# Altium schematic symbol library Borisov.schlib: 51 symbols
Pins are listed as number, name and electrical type; pins without a type are passive.

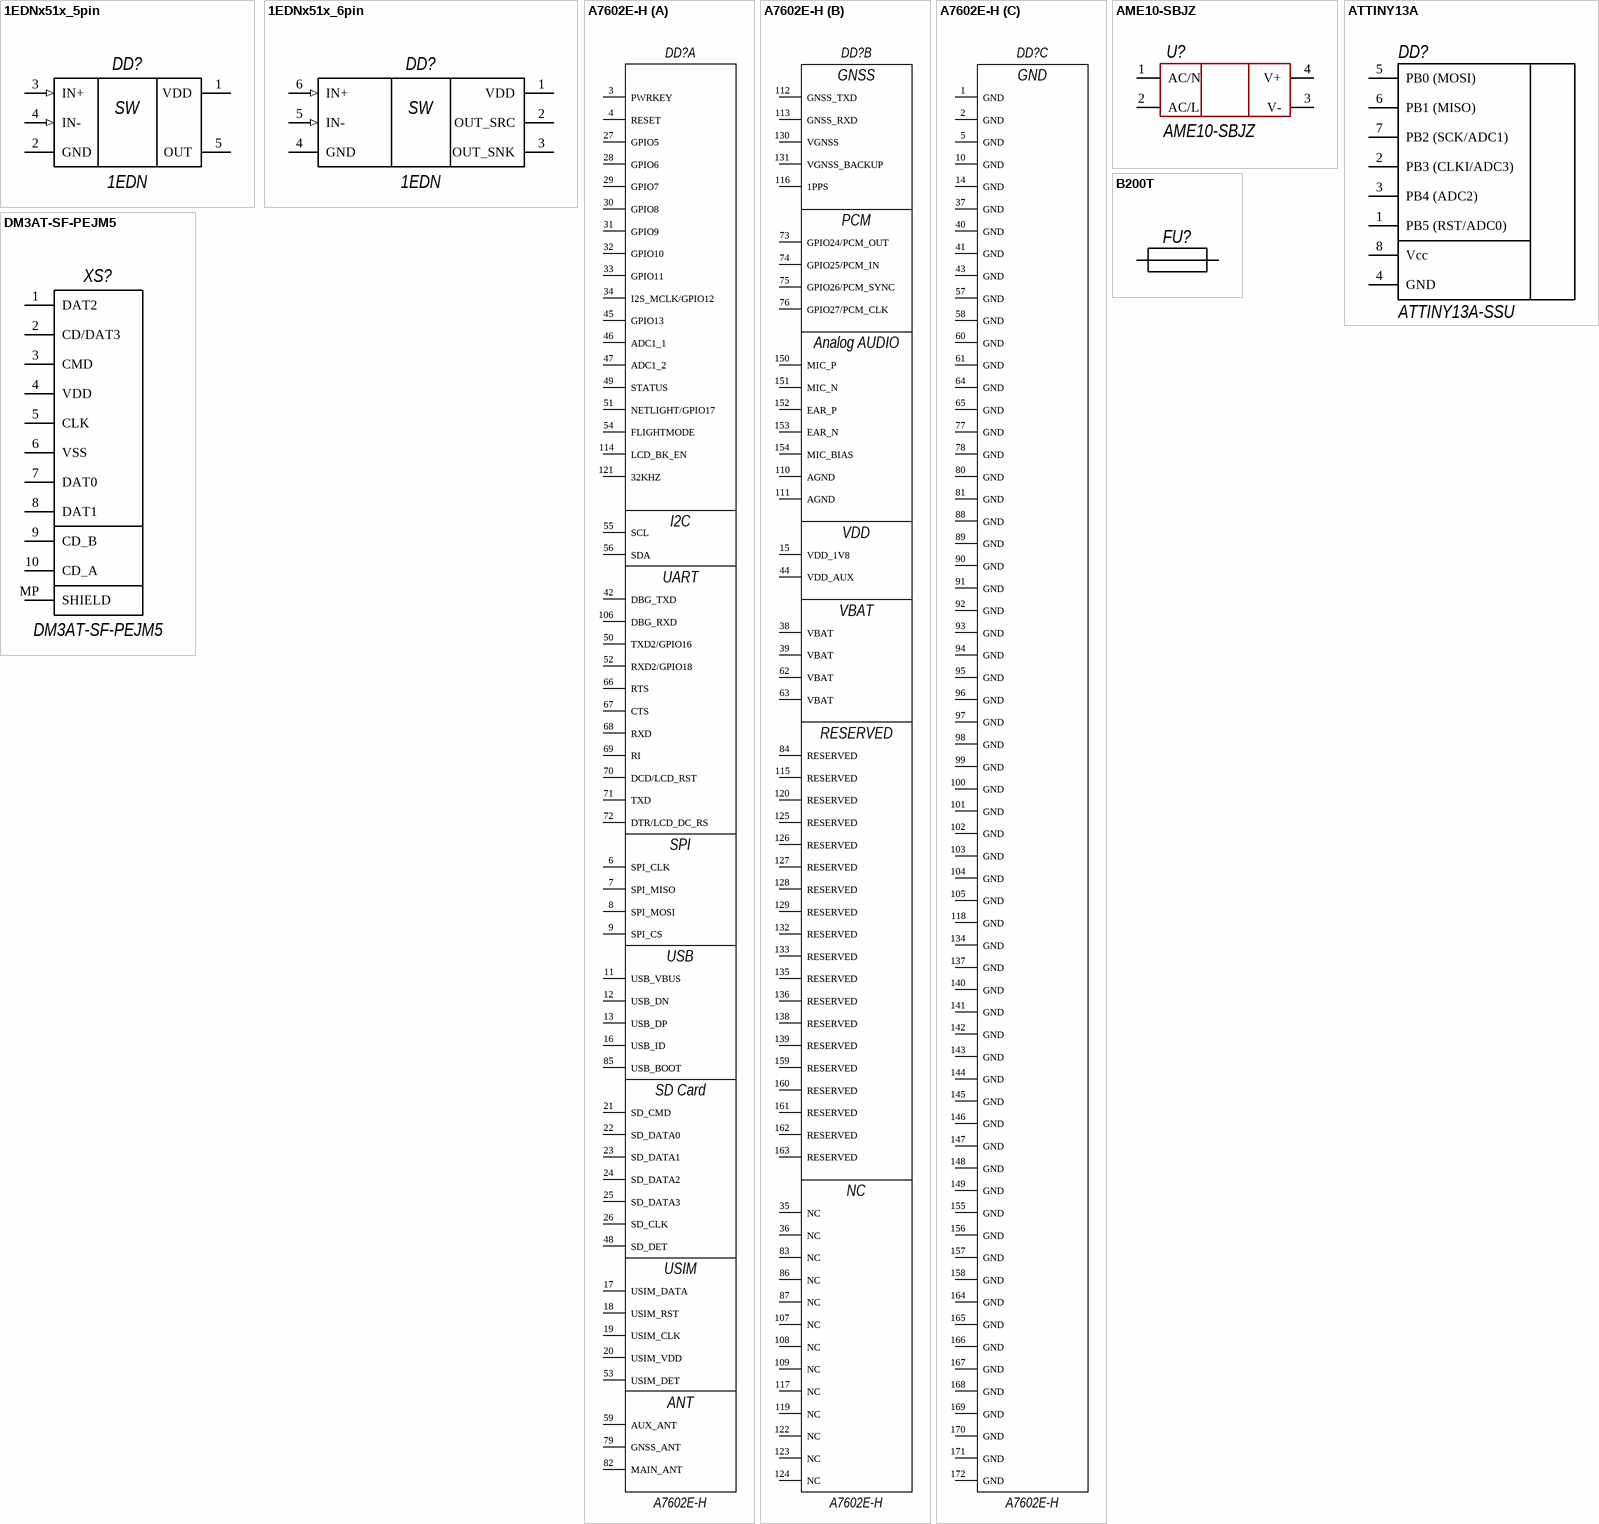
[diagram p0: symbols 1EDNx51x_5pin to DM3AT-SF-PEJM5]

## 1EDNx51x_5pin
designator DD?, comment 1EDN
Драйвер MOSFET, 1-канал, Low-Side, не-/инвертирующий, 4/8А, 4.5…20В
footprint SOT-23-5
pins: 1 VDD (power), 2 GND (power), 3 IN+ (in), 4 IN- (in), 5 OUT
text: SW

## 1EDNx51x_6pin
designator DD?, comment 1EDN
Драйвер MOSFET, 1-канал, Low-Side, не-/инвертирующий, 4/8А, 4.5…20В
footprint SOT-23-6
pins: 1 VDD (power), 2 OUT_SRC, 3 OUT_SNK, 4 GND (power), 5 IN- (in), 6 IN+ (in)
text: SW

## A7602E-H
designator DD?
footprint A7602EH
part A pins: 3 PWRKEY, 4 RESET, 6 SPI_CLK, 7 SPI_MISO, 8 SPI_MOSI, 9 SPI_CS, 11 USB_VBUS, 12 USB_DN, 13 USB_DP, 16 USB_ID, 17 USIM_DATA, 18 USIM_RST, 19 USIM_CLK, 20 USIM_VDD, 21 SD_CMD, 22 SD_DATA0, 23 SD_DATA1, 24 SD_DATA2, 25 SD_DATA3, 26 SD_CLK, 27 GPIO5, 28 GPIO6, 29 GPIO7, 30 GPIO8, 31 GPIO9, 32 GPIO10, 33 GPIO11, 34 I2S_MCLK/GPIO12, 42 DBG_TXD, 45 GPIO13, 46 ADC1_1, 47 ADC1_2, 48 SD_DET, 49 STATUS, 50 TXD2/GPIO16, 51 NETLIGHT/GPIO17, 52 RXD2/GPIO18, 53 USIM_DET, 54 FLIGHTMODE, 55 SCL, 56 SDA, 59 AUX_ANT, 66 RTS, 67 CTS, 68 RXD, 69 RI, 70 DCD/LCD_RST, 71 TXD, 72 DTR/LCD_DC_RS, 79 GNSS_ANT, 82 MAIN_ANT, 85 USB_BOOT, 106 DBG_RXD, 114 LCD_BK_EN, 121 32KHZ
part B pins: 15 VDD_1V8 (power), 35 NC, 36 NC, 38 VBAT (power), 39 VBAT (power), 44 VDD_AUX (power), 62 VBAT (power), 63 VBAT (power), 73 GPIO24/PCM_OUT, 74 GPIO25/PCM_IN, 75 GPIO26/PCM_SYNC, 76 GPIO27/PCM_CLK, 83 NC, 84 RESERVED, 86 NC, 87 NC, 107 NC, 108 NC (power), 109 NC (power), 110 AGND (power), 111 AGND (power), 112 GNSS_TXD, 113 GNSS_RXD, 115 RESERVED, 116 1PPS, 117 NC, 119 NC, 120 RESERVED, 122 NC, 123 NC, 124 NC, 125 RESERVED, 126 RESERVED, 127 RESERVED, 128 RESERVED, 129 RESERVED, 130 VGNSS, 131 VGNSS_BACKUP, 132 RESERVED, 133 RESERVED, 135 RESERVED, 136 RESERVED, 138 RESERVED, 139 RESERVED, 150 MIC_P, 151 MIC_N, 152 EAR_P, 153 EAR_N, 154 MIC_BIAS, 159 RESERVED, 160 RESERVED, 161 RESERVED, 162 RESERVED, 163 RESERVED
part C pins: 1 GND (power), 2 GND (power), 5 GND (power), 10 GND (power), 14 GND (power), 37 GND (power), 40 GND (power), 41 GND (power), 43 GND (power), 57 GND (power), 58 GND (power), 60 GND (power), 61 GND (power), 64 GND (power), 65 GND (power), 77 GND (power), 78 GND (power), 80 GND (power), 81 GND (power), 88 GND (power), 89 GND (power), 90 GND (power), 91 GND (power), 92 GND (power), 93 GND (power), 94 GND (power), 95 GND (power), 96 GND (power), 97 GND (power), 98 GND (power), 99 GND (power), 100 GND (power), 101 GND (power), 102 GND (power), 103 GND (power), 104 GND (power), 105 GND (power), 118 GND (power), 134 GND (power), 137 GND (power), 140 GND (power), 141 GND (power), 142 GND (power), 143 GND (power), 144 GND (power), 145 GND (power), 146 GND (power), 147 GND (power), 148 GND (power), 149 GND (power), 155 GND (power), 156 GND (power), 157 GND (power), 158 GND (power), 164 GND (power), 165 GND (power), 166 GND (power), 167 GND (power), 168 GND (power), 169 GND (power), 170 GND (power), 171 GND (power), 172 GND (power)
part A text: I2C; UART; SPI; USB; SD Card; USIM; ANT
part B text: GNSS; PCM; Analog AUDIO; VDD

## AME10-SBJZ
designator U?
AC/DC; 10W; Vin: 90-528VAC, 100-745VDC;
footprint AME10-SBJZ
pins: 1 AC/N, 2 AC/L, 3 V-, 4 V+

## ATTINY13A
designator DD?, comment ATTINY13A-SSU
Микроконтроллер 8-Бит, picoPower, AVR, 20МГц, 1КБ Flash [SO-8]
footprint SO-8
pins: 1 PB5 (RST/ADC0), 2 PB3 (CLKI/ADC3), 3 PB4 (ADC2), 4 GND, 5 PB0 (MOSI), 6 PB1 (MISO), 7 PB2 (SCK/ADC1), 8 Vcc

## B200T
designator FU?  (value not drawn)
FUSE BOARD MOUNT 2A 600VAC 2SMD; Manufacturer: Bourns Inc.; Time-Current Type: {Time-Current Type}; Voltage Breaking AC: 600V; DC Cold Resistance: 0.056; Type: SMD
footprint B2000T_ (FUSE BOARD MOUNT 2A 600VAC 2SMD)
pins: 1, 2

## DM3AT-SF-PEJM5
designator XS?
microSD
footprint DM3ATSFPEJM5
pins: 1 DAT2, 2 CD/DAT3, 3 CMD, 4 VDD, 5 CLK, 6 VSS, 7 DAT0, 8 DAT1, 9 CD_B, 10 CD_A, MP SHIELD

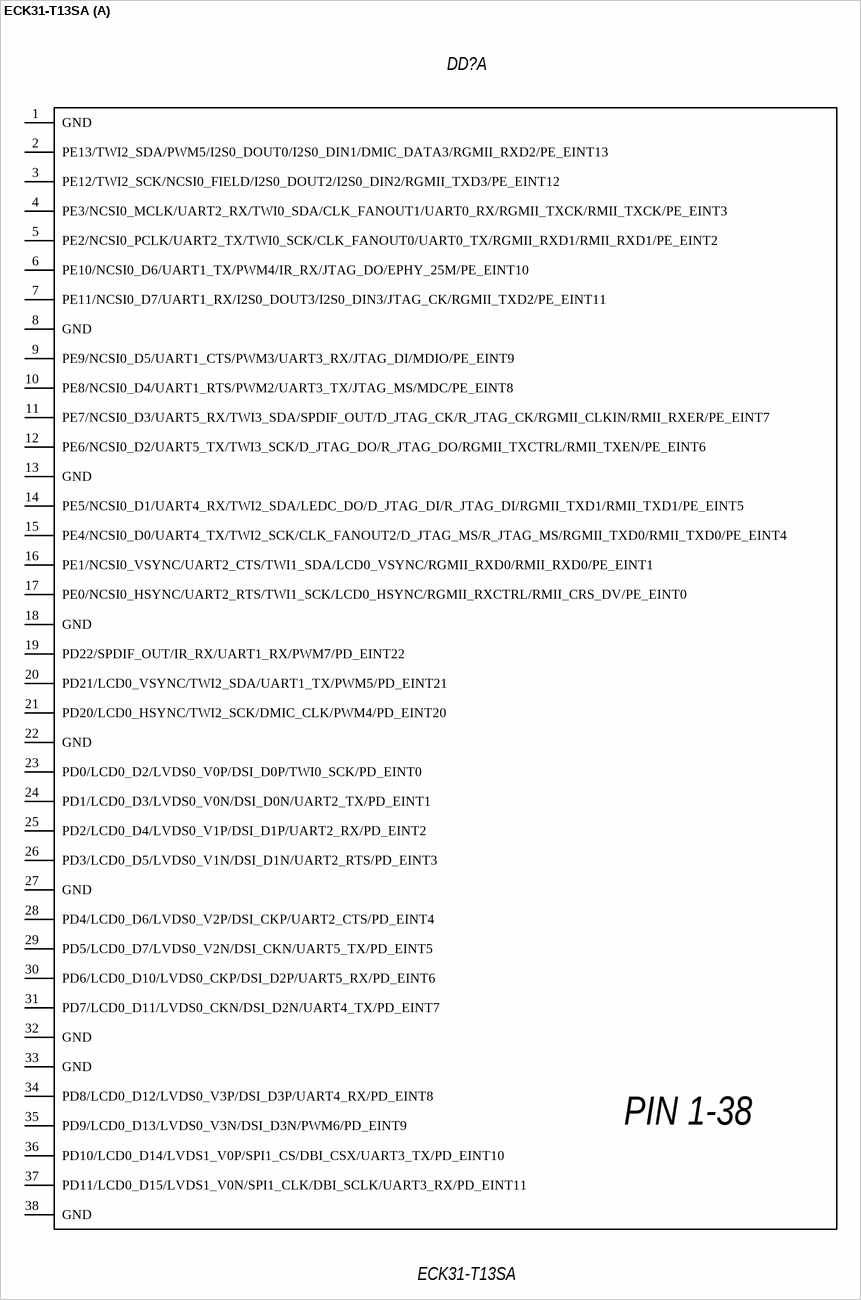
[diagram p1: symbol ECK31-T13SA]

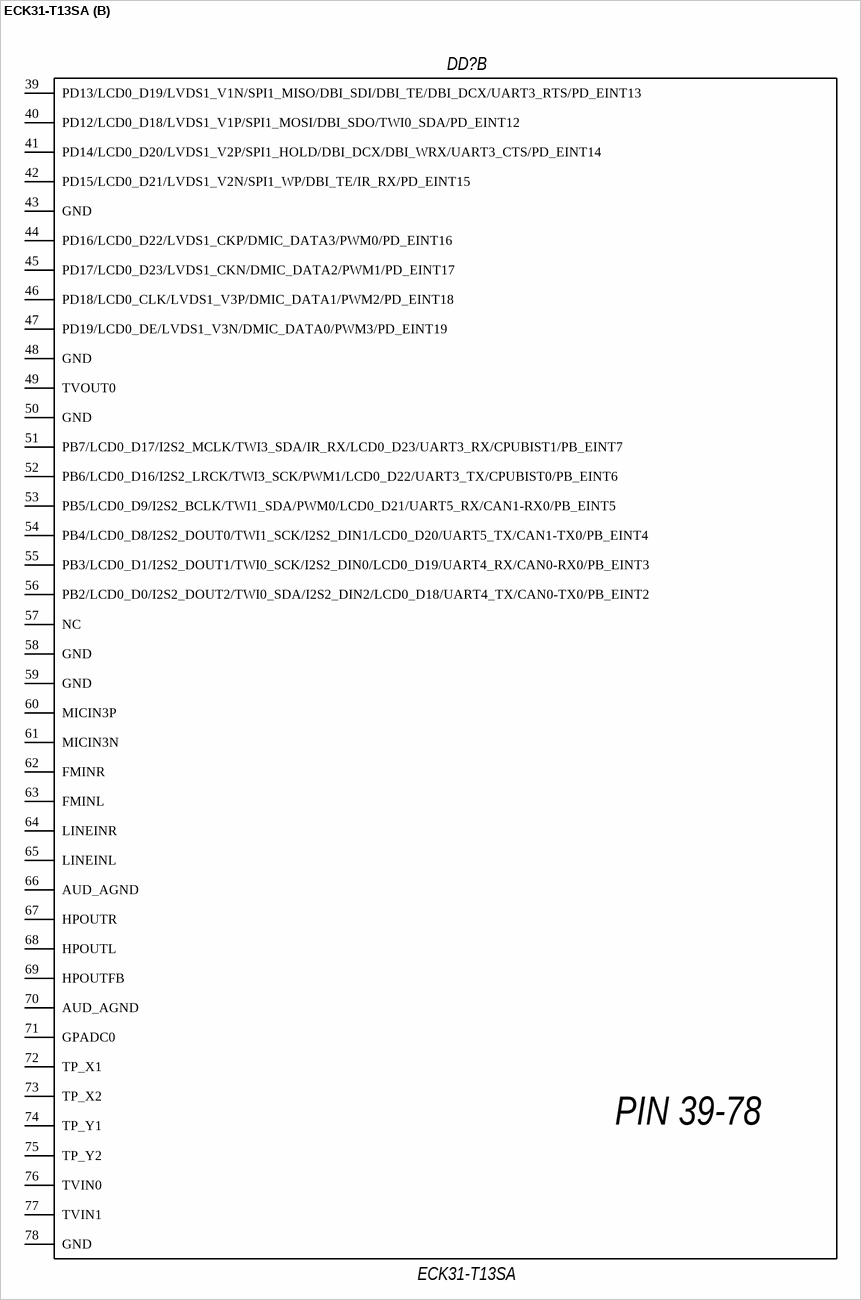
[diagram p2: symbol ECK31-T13SA]

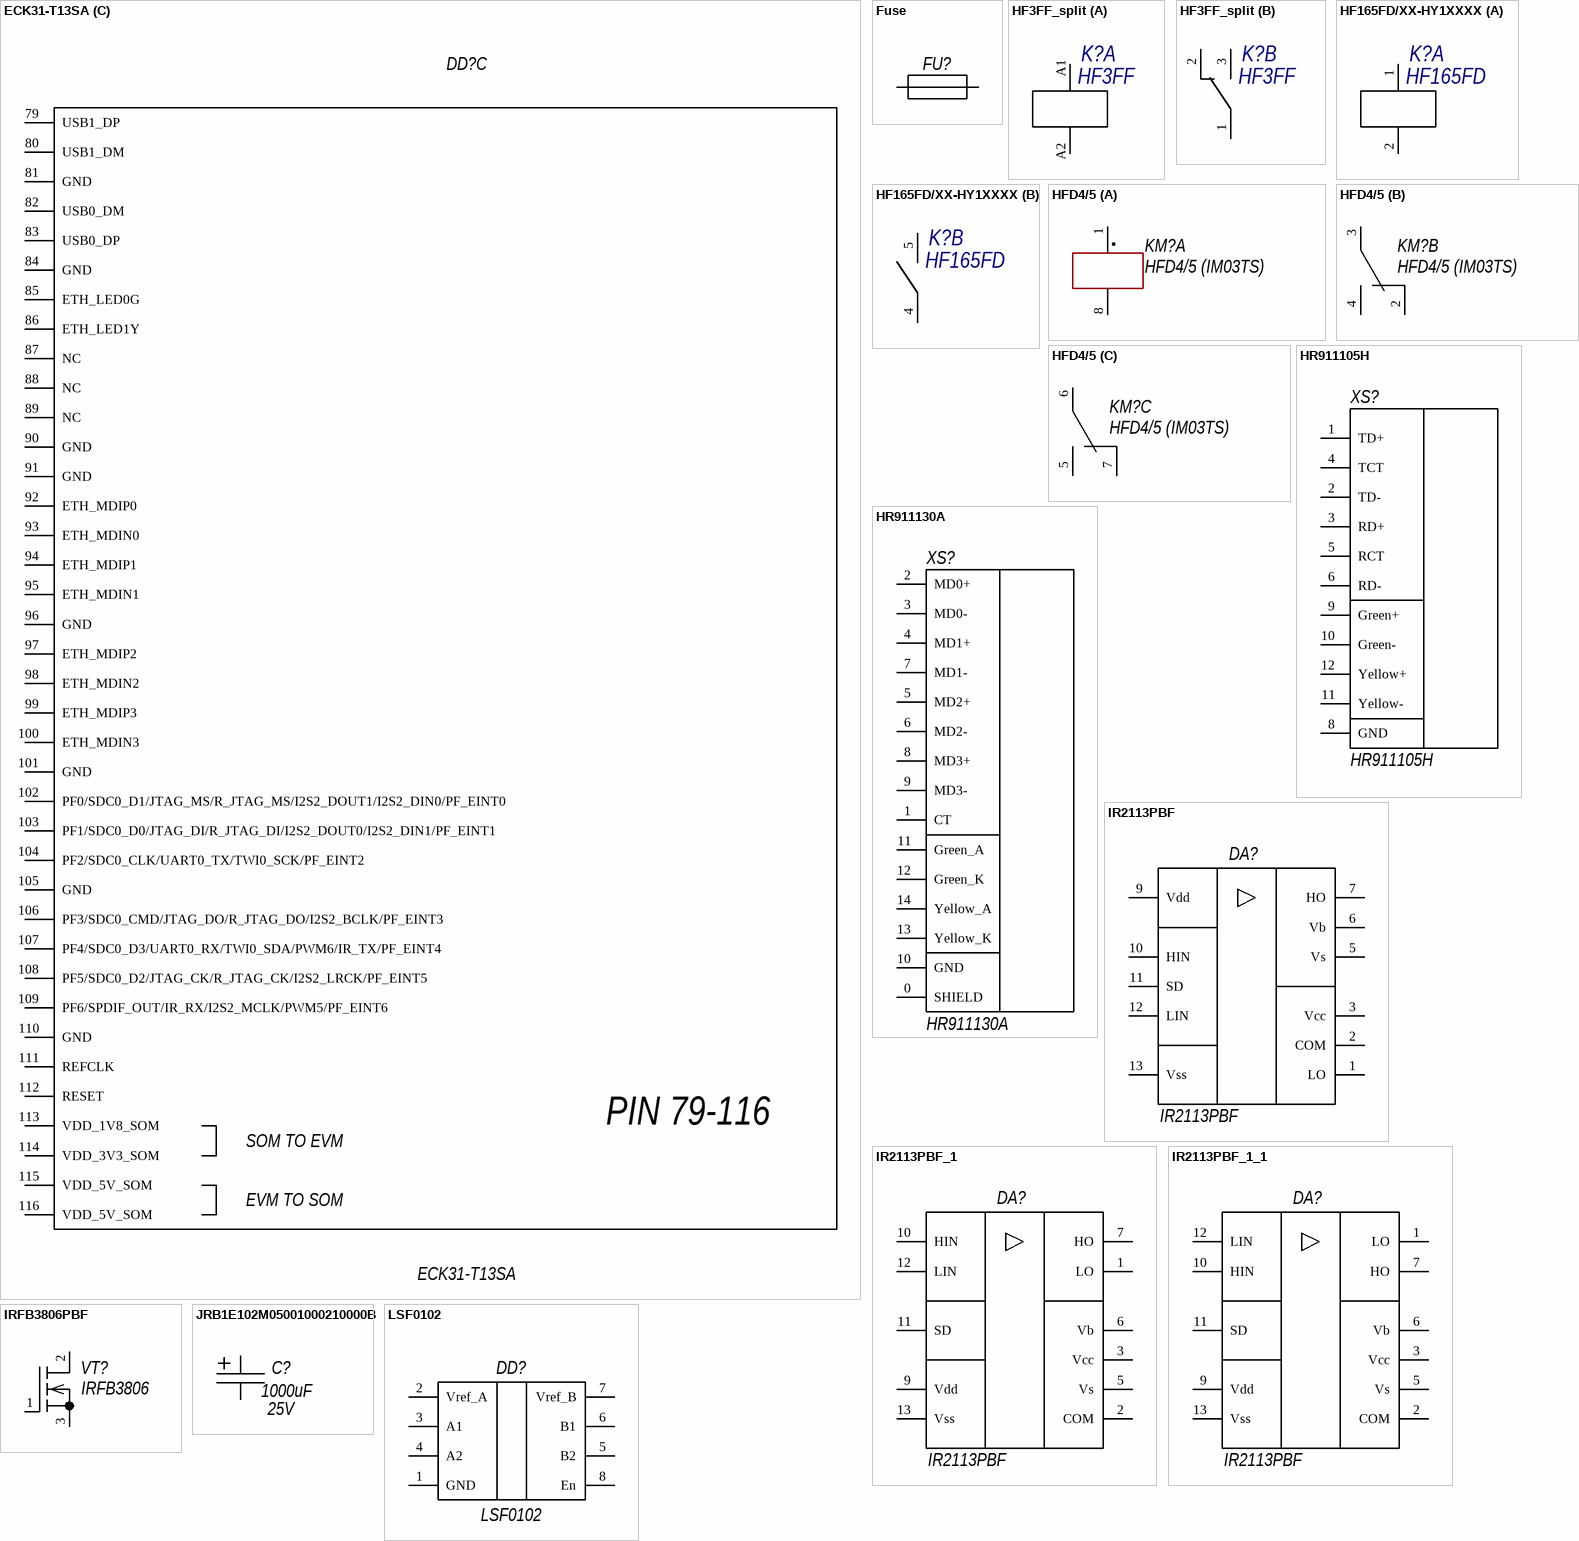
[diagram p3: symbols ECK31-T13SA to LSF0102]

## ECK31-T13SA
designator DD?
footprint ECK31_T13SA_P116
part A pins: 1 GND (power), 2 PE13/TWI2_SDA/PWM5/I2S0_DOUT0/I2S0_DIN1/DMIC_DATA3/RGMII_RXD2/PE_EINT13, 3 PE12/TWI2_SCK/NCSI0_FIELD/I2S0_DOUT2/I2S0_DIN2/RGMII_TXD3/PE_EINT12, 4 PE3/NCSI0_MCLK/UART2_RX/TWI0_SDA/CLK_FANOUT1/UART0_RX/RGMII_TXCK/RMII_TXCK/PE_EINT3, 5 PE2/NCSI0_PCLK/UART2_TX/TWI0_SCK/CLK_FANOUT0/UART0_TX/RGMII_RXD1/RMII_RXD1/PE_EINT2, 6 PE10/NCSI0_D6/UART1_TX/PWM4/IR_RX/JTAG_DO/EPHY_25M/PE_EINT10, 7 PE11/NCSI0_D7/UART1_RX/I2S0_DOUT3/I2S0_DIN3/JTAG_CK/RGMII_TXD2/PE_EINT11, 8 GND (power), 9 PE9/NCSI0_D5/UART1_CTS/PWM3/UART3_RX/JTAG_DI/MDIO/PE_EINT9, 10 PE8/NCSI0_D4/UART1_RTS/PWM2/UART3_TX/JTAG_MS/MDC/PE_EINT8, 11 PE7/NCSI0_D3/UART5_RX/TWI3_SDA/SPDIF_OUT/D_JTAG_CK/R_JTAG_CK/RGMII_CLKIN/RMII_RXER/PE_EINT7, 12 PE6/NCSI0_D2/UART5_TX/TWI3_SCK/D_JTAG_DO/R_JTAG_DO/RGMII_TXCTRL/RMII_TXEN/PE_EINT6, 13 GND (power), 14 PE5/NCSI0_D1/UART4_RX/TWI2_SDA/LEDC_DO/D_JTAG_DI/R_JTAG_DI/RGMII_TXD1/RMII_TXD1/PE_EINT5, 15 PE4/NCSI0_D0/UART4_TX/TWI2_SCK/CLK_FANOUT2/D_JTAG_MS/R_JTAG_MS/RGMII_TXD0/RMII_TXD0/PE_EINT4, 16 PE1/NCSI0_VSYNC/UART2_CTS/TWI1_SDA/LCD0_VSYNC/RGMII_RXD0/RMII_RXD0/PE_EINT1, 17 PE0/NCSI0_HSYNC/UART2_RTS/TWI1_SCK/LCD0_HSYNC/RGMII_RXCTRL/RMII_CRS_DV/PE_EINT0, 18 GND (power), 19 PD22/SPDIF_OUT/IR_RX/UART1_RX/PWM7/PD_EINT22, 20 PD21/LCD0_VSYNC/TWI2_SDA/UART1_TX/PWM5/PD_EINT21, 21 PD20/LCD0_HSYNC/TWI2_SCK/DMIC_CLK/PWM4/PD_EINT20, 22 GND (power), 23 PD0/LCD0_D2/LVDS0_V0P/DSI_D0P/TWI0_SCK/PD_EINT0, 24 PD1/LCD0_D3/LVDS0_V0N/DSI_D0N/UART2_TX/PD_EINT1, 25 PD2/LCD0_D4/LVDS0_V1P/DSI_D1P/UART2_RX/PD_EINT2, 26 PD3/LCD0_D5/LVDS0_V1N/DSI_D1N/UART2_RTS/PD_EINT3, 27 GND (power), 28 PD4/LCD0_D6/LVDS0_V2P/DSI_CKP/UART2_CTS/PD_EINT4, 29 PD5/LCD0_D7/LVDS0_V2N/DSI_CKN/UART5_TX/PD_EINT5, 30 PD6/LCD0_D10/LVDS0_CKP/DSI_D2P/UART5_RX/PD_EINT6, 31 PD7/LCD0_D11/LVDS0_CKN/DSI_D2N/UART4_TX/PD_EINT7, 32 GND (power), 33 GND (power), 34 PD8/LCD0_D12/LVDS0_V3P/DSI_D3P/UART4_RX/PD_EINT8, 35 PD9/LCD0_D13/LVDS0_V3N/DSI_D3N/PWM6/PD_EINT9, 36 PD10/LCD0_D14/LVDS1_V0P/SPI1_CS/DBI_CSX/UART3_TX/PD_EINT10, 37 PD11/LCD0_D15/LVDS1_V0N/SPI1_CLK/DBI_SCLK/UART3_RX/PD_EINT11, 38 GND (power)
part B pins: 39 PD13/LCD0_D19/LVDS1_V1N/SPI1_MISO/DBI_SDI/DBI_TE/DBI_DCX/UART3_RTS/PD_EINT13, 40 PD12/LCD0_D18/LVDS1_V1P/SPI1_MOSI/DBI_SDO/TWI0_SDA/PD_EINT12, 41 PD14/LCD0_D20/LVDS1_V2P/SPI1_HOLD/DBI_DCX/DBI_WRX/UART3_CTS/PD_EINT14, 42 PD15/LCD0_D21/LVDS1_V2N/SPI1_WP/DBI_TE/IR_RX/PD_EINT15, 43 GND (power), 44 PD16/LCD0_D22/LVDS1_CKP/DMIC_DATA3/PWM0/PD_EINT16, 45 PD17/LCD0_D23/LVDS1_CKN/DMIC_DATA2/PWM1/PD_EINT17, 46 PD18/LCD0_CLK/LVDS1_V3P/DMIC_DATA1/PWM2/PD_EINT18, 47 PD19/LCD0_DE/LVDS1_V3N/DMIC_DATA0/PWM3/PD_EINT19, 48 GND (power), 49 TVOUT0, 50 GND, 51 PB7/LCD0_D17/I2S2_MCLK/TWI3_SDA/IR_RX/LCD0_D23/UART3_RX/CPUBIST1/PB_EINT7, 52 PB6/LCD0_D16/I2S2_LRCK/TWI3_SCK/PWM1/LCD0_D22/UART3_TX/CPUBIST0/PB_EINT6, 53 PB5/LCD0_D9/I2S2_BCLK/TWI1_SDA/PWM0/LCD0_D21/UART5_RX/CAN1-RX0/PB_EINT5, 54 PB4/LCD0_D8/I2S2_DOUT0/TWI1_SCK/I2S2_DIN1/LCD0_D20/UART5_TX/CAN1-TX0/PB_EINT4, 55 PB3/LCD0_D1/I2S2_DOUT1/TWI0_SCK/I2S2_DIN0/LCD0_D19/UART4_RX/CAN0-RX0/PB_EINT3, 56 PB2/LCD0_D0/I2S2_DOUT2/TWI0_SDA/I2S2_DIN2/LCD0_D18/UART4_TX/CAN0-TX0/PB_EINT2, 57 NC, 58 GND (power), 59 GND (power), 60 MICIN3P, 61 MICIN3N, 62 FMINR, 63 FMINL, 64 LINEINR, 65 LINEINL, 66 AUD_AGND, 67 HPOUTR, 68 HPOUTL, 69 HPOUTFB, 70 AUD_AGND, 71 GPADC0, 72 TP_X1, 73 TP_X2, 74 TP_Y1, 75 TP_Y2, 76 TVIN0, 77 TVIN1, 78 GND (power)
part C pins: 79 USB1_DP, 80 USB1_DM, 81 GND (power), 82 USB0_DM, 83 USB0_DP, 84 GND (power), 85 ETH_LED0G, 86 ETH_LED1Y, 87 NC, 88 NC, 89 NC, 90 GND (power), 91 GND (power), 92 ETH_MDIP0, 93 ETH_MDIN0, 94 ETH_MDIP1, 95 ETH_MDIN1, 96 GND (power), 97 ETH_MDIP2, 98 ETH_MDIN2, 99 ETH_MDIP3, 100 ETH_MDIN3, 101 GND (power), 102 PF0/SDC0_D1/JTAG_MS/R_JTAG_MS/I2S2_DOUT1/I2S2_DIN0/PF_EINT0, 103 PF1/SDC0_D0/JTAG_DI/R_JTAG_DI/I2S2_DOUT0/I2S2_DIN1/PF_EINT1, 104 PF2/SDC0_CLK/UART0_TX/TWI0_SCK/PF_EINT2, 105 GND (power), 106 PF3/SDC0_CMD/JTAG_DO/R_JTAG_DO/I2S2_BCLK/PF_EINT3, 107 PF4/SDC0_D3/UART0_RX/TWI0_SDA/PWM6/IR_TX/PF_EINT4, 108 PF5/SDC0_D2/JTAG_CK/R_JTAG_CK/I2S2_LRCK/PF_EINT5, 109 PF6/SPDIF_OUT/IR_RX/I2S2_MCLK/PWM5/PF_EINT6, 110 GND (power), 111 REFCLK, 112 RESET, 113 VDD_1V8_SOM, 114 VDD_3V3_SOM, 115 VDD_5V_SOM, 116 VDD_5V_SOM
part A text: PIN 1-38
part B text: PIN 39-78
part C text: PIN 79-116; SOM TO EVM; EVM TO SOM

## Fuse
designator FU?  (value not drawn)
Fuse; Time-Current Type: {Time-Current Type}
pins: 1, 2

## HF3FF_split
designator K?  value HF3FF  (hidden comment: *)
Power, 12VDC simple coil; 1x 250VAC-10A CO monostab.; Manufacturer: Tyco; Coil Resistance: 400Ω; Coil Voltage (Release): 1.2Vdc; Contact Current (Max): 10A; Coil Voltage (Trip): 9Vdc; Contact Current (Nom): 6A; Contact Volage (Max): 400Vac; Contact Volage (Rate): 250Vac; Coil Voltage (Rate): 12Vdc; Type: 6-1415356-1
footprint HF3FF Relay
part A pins: A1 1, A2 2
part B pins: 1 COM, 2 NC, 3 NO

## HF165FD/XX-HY1XXXX
designator K?  value HF165FD  (hidden comment: *)
Power, 277VAC simple coil, 1x 250VAC-16A CO monostab.; Manufacturer: Tyco; Coil Resistance: 32.5kΩ; Coil Voltage (Rate): 230Vac; Coil Voltage (Release): 34.5Vac; Contact Current (Max): 30A; Coil Voltage (Trip): 172.5Vac; Contact Current (Nom): 16A; Contact Volage (Max): 400Vac; Contact Volage (Rate): 250Vac; Type: 0-1393240-7
footprint HF165FD/XX-HY1XXXX
part A pins: 1, 2
part B pins: 4 COM, 5 NO

## HFD4/5
designator KM?, comment HFD4/5 (IM03TS)
https://www.chipdip.ru/product/hfd4-5-im03ts
footprint HFD4/5 (IM03TS) (HFD4/5 (IM03TS) (1-1462037-8), Реле 2 переключ. 5VDC, 2A/250VAC DPDT)
part A pins: 1, 8
part B pins: 2, 3, 4
part C pins: 5, 6, 7

## HR911105H
designator XS?
Single port RJ-45 connector with integrated magnetics / https://www.chipdip.ru/product/hr911105h-hanrun-8001790038
footprint HR911105H (Single port RJ-45 connector with integrated magnetics)
pins: 1 TD+, 2 TD-, 3 RD+, 4 TCT, 5 RCT, 6 RD-, 8 GND, 9 Green+, 10 Green-, 11 Yellow-, 12 Yellow+

## HR911130A
designator XS?
Single port RJ-45 connector with integrated magnetics
footprint HR911130A (Single port RJ-45 connector with integrated magnetics)
pins: 0 SHIELD, 1 CT, 2 MD0+, 3 MD0-, 4 MD1+, 5 MD2+, 6 MD2-, 7 MD1-, 8 MD3+, 9 MD3-, 10 GND, 11 Green_A, 12 Green_K, 13 Yellow_K, 14 Yellow_A

## IR2113PBF
designator DA?
IR2113PBF, Драйвер ключей нижнего и верхнего уровней; Manufacturer: Infineon
footprint DIP-14
pins: 1 LO, 2 COM, 3 Vcc, 5 Vs, 6 Vb, 7 HO, 9 Vdd, 10 HIN, 11 SD, 12 LIN, 13 Vss

## IR2113PBF_1
designator DA?, comment IR2113PBF
IR2113PBF, Драйвер ключей нижнего и верхнего уровней; Manufacturer: Infineon
footprint DIP-14
pins: 1 LO, 2 COM, 3 Vcc, 5 Vs, 6 Vb, 7 HO, 9 Vdd, 10 HIN, 11 SD, 12 LIN, 13 Vss

## IR2113PBF_1_1
designator DA?, comment IR2113PBF
IR2113PBF, Драйвер ключей нижнего и верхнего уровней; Manufacturer: Infineon
footprint DIP-14
pins: 1 LO, 2 COM, 3 Vcc, 5 Vs, 6 Vb, 7 HO, 9 Vdd, 10 HIN, 11 SD, 12 LIN, 13 Vss

## IRFB3806PBF
designator VT?, comment Article: IRFB3806  (hidden comment: Транзистор, N-канал 60В 43А [TO-220AB])
N-ch HexFET™ MOSFET, TO-220AB, Vd=60V, Id=43A, Rds=12.6mΩ, Vgth=4.0V; Manufacturer: Infineon; Type/Value: IRFB3806
footprint TO-220AB(T)-3L_Str_VERT
footprint TO-220AB(T)-3L_1&3Bent1905_VERT
footprint TO-220AB(T)-3L_2Pull2540_VERT
footprint TO-220AB(T)-3L_Str_BACK5080
footprint TO-220AB(T)-3L_2Pull2540_FACE5080
footprint TO-220AB(T)-3L_Str_FACE5080
footprint TO-220AB(T)-3L_2Pull2540_BACK5080
footprint TO-220AB(T)-3L_1&3Pull2540_VERT
footprint TO-220AB(T)-3L_1&3Pull2540_BACK5080
footprint TO-220AB(T)-3L_1&3Pull2540_FACE5080
pins: 1 G, 2 D, 3 S

## JRB1E102M05001000210000B
designator C?, comment Voltage: 25V  Type/Value: 1000uF  (hidden comment: JRB1E102M05001000210000B, Конденсатор электролитический 1000мкФ, 25В, 105°C, 20%, 10x21мм P:5мм)
Electrolyte, 1000uF, 25V; 5mm DxL 10x21; Manufacturer: JB Capacitors; Article: JRB1E102M05001000210000B
footprint CAPAER_D1000_L2100_P0500_W60X300
pins: 1, 2

## LSF0102
designator DD?
Преобразователь уровня напряжения, двунаправленный, 0.95…3.3В - 1.8...5В
footprint VSSOP-8
pins: 1 GND, 2 Vref_A, 3 A1, 4 A2, 5 B2, 6 B1, 7 Vref_B, 8 En

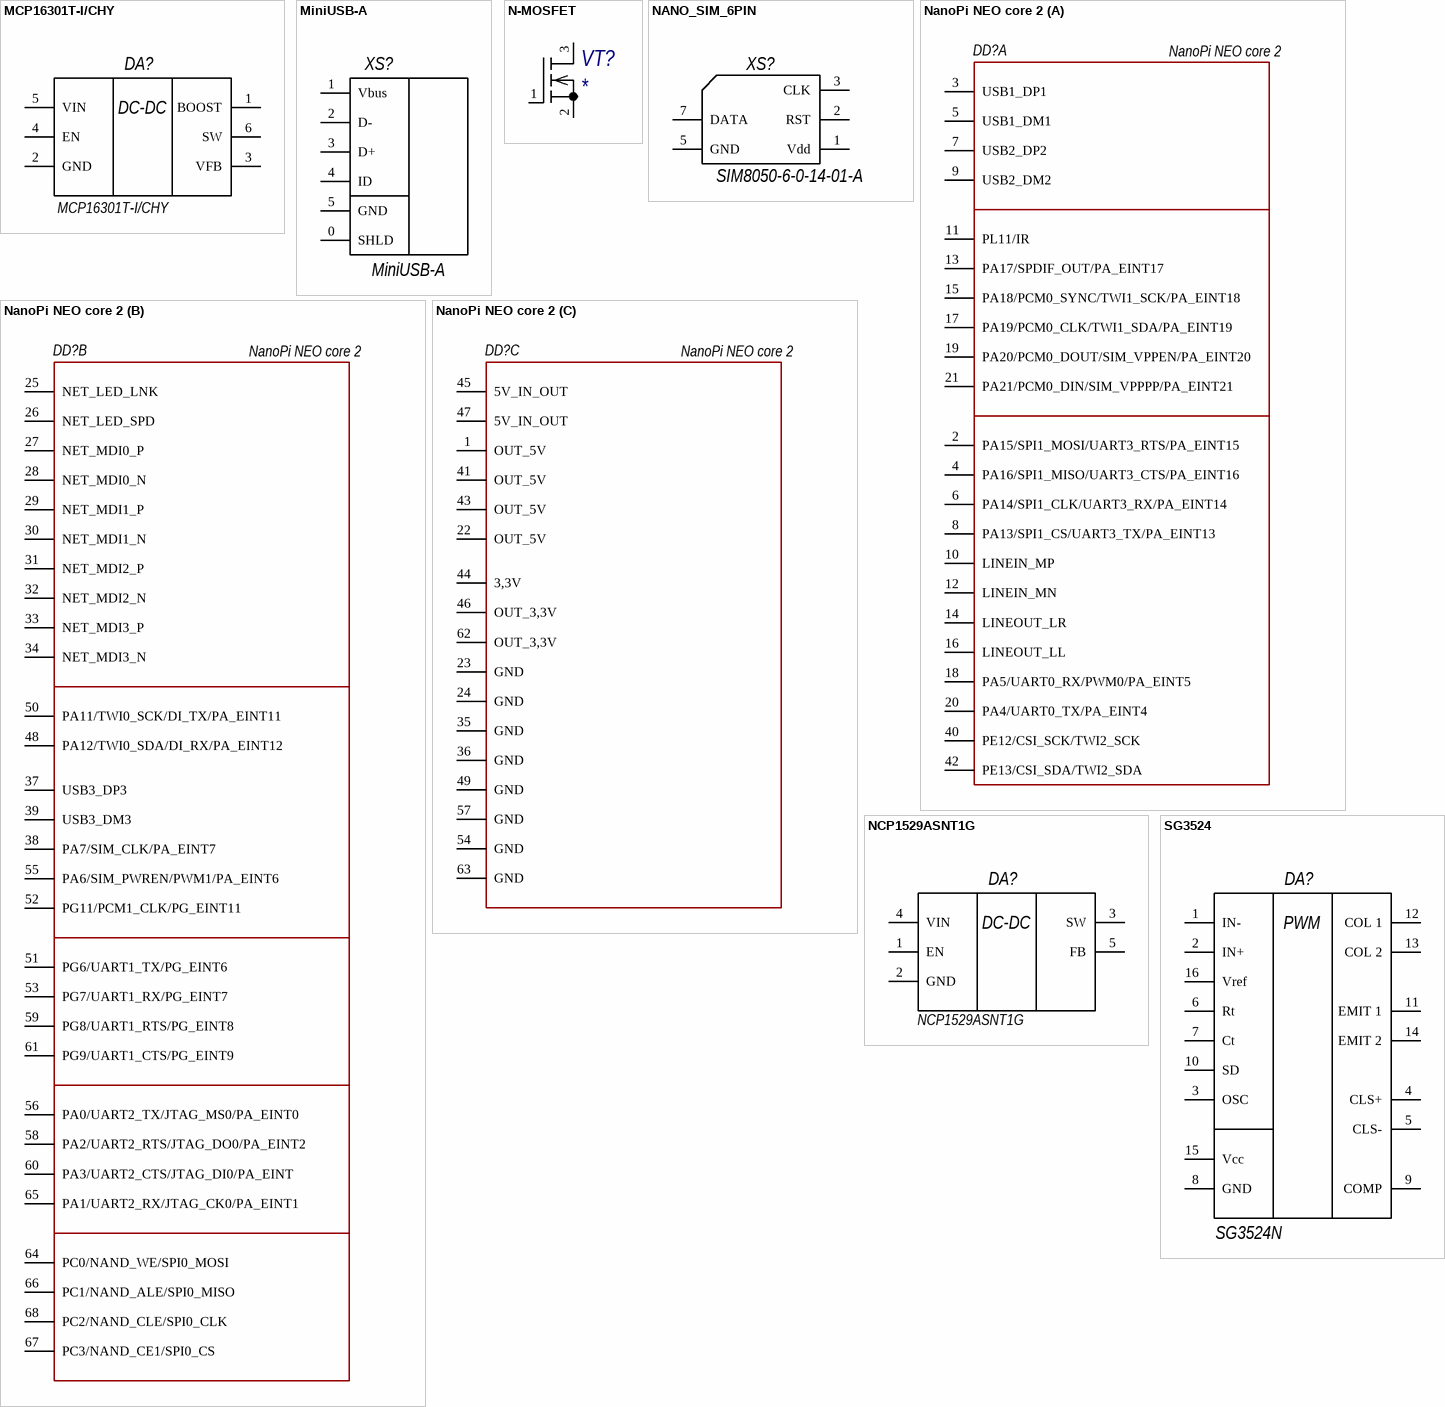
[diagram p4: symbols MCP16301T-I/CHY to SG3524]

## MCP16301T-I/CHY
designator DA?
MCP16301T-I/CHY, DC/DC преобразователь, понижающий, Uвх=4…30В, Uвых=2...15В, 0.6А [SOT-23-6]; Manufacturer: Texas Instruments; Value: MCP16301T-I/CHY
footprint SOT-23-6
pins: 1 BOOST, 2 GND, 3 VFB, 4 EN, 5 VIN, 6 SW
text: DC-DC

## MiniUSB-A
designator XS?
footprint USB_mini
pins: 0 SHLD, 1 Vbus, 2 D-, 3 D+, 4 ID, 5 GND

## N-MOSFET
designator VT?, comment Транзистор N-MOSFET  (value not drawn)
Manufacturer: {Manufacturer}; Type/Value: *; Article: *
pins: 1 G, 2 S, 3 D

## NANO_SIM_6PIN
designator XS?, comment SIM8050-6-0-14-01-A
https://www.chipdip.ru/product/sim8050-6-0-14-01-a-nano-sim-derzhatel-razem-karty-6-gct-8020496451
footprint NANO_SIM (Разъем: для карт памяти; Nano SIM; SMT; PIN: 6)
pins: 1 Vdd, 2 RST, 3 CLK, 5 GND, 7 DATA

## NanoPi NEO core 2
designator DD?
footprint NANOPI NEO CORE
part A pins: 2 PA15/SPI1_MOSI/UART3_RTS/PA_EINT15, 3 USB1_DP1, 4 PA16/SPI1_MISO/UART3_CTS/PA_EINT16, 5 USB1_DM1, 6 PA14/SPI1_CLK/UART3_RX/PA_EINT14, 7 USB2_DP2, 8 PA13/SPI1_CS/UART3_TX/PA_EINT13, 9 USB2_DM2, 10 LINEIN_MP, 11 PL11/IR, 12 LINEIN_MN, 13 PA17/SPDIF_OUT/PA_EINT17, 14 LINEOUT_LR, 15 PA18/PCM0_SYNC/TWI1_SCK/PA_EINT18, 16 LINEOUT_LL, 17 PA19/PCM0_CLK/TWI1_SDA/PA_EINT19, 18 PA5/UART0_RX/PWM0/PA_EINT5, 19 PA20/PCM0_DOUT/SIM_VPPEN/PA_EINT20, 20 PA4/UART0_TX/PA_EINT4, 21 PA21/PCM0_DIN/SIM_VPPPP/PA_EINT21, 40 PE12/CSI_SCK/TWI2_SCK, 42 PE13/CSI_SDA/TWI2_SDA
part B pins: 25 NET_LED_LNK, 26 NET_LED_SPD, 27 NET_MDI0_P, 28 NET_MDI0_N, 29 NET_MDI1_P, 30 NET_MDI1_N, 31 NET_MDI2_P, 32 NET_MDI2_N, 33 NET_MDI3_P, 34 NET_MDI3_N, 37 USB3_DP3, 38 PA7/SIM_CLK/PA_EINT7, 39 USB3_DM3, 48 PA12/TWI0_SDA/DI_RX/PA_EINT12, 50 PA11/TWI0_SCK/DI_TX/PA_EINT11, 51 PG6/UART1_TX/PG_EINT6 , 52 PG11/PCM1_CLK/PG_EINT11, 53 PG7/UART1_RX/PG_EINT7, 55 PA6/SIM_PWREN/PWM1/PA_EINT6, 56 PA0/UART2_TX/JTAG_MS0/PA_EINT0, 58 PA2/UART2_RTS/JTAG_DO0/PA_EINT2, 59 PG8/UART1_RTS/PG_EINT8 , 60 PA3/UART2_CTS/JTAG_DI0/PA_EINT, 61 PG9/UART1_CTS/PG_EINT9, 64 PC0/NAND_WE/SPI0_MOSI , 65 PA1/UART2_RX/JTAG_CK0/PA_EINT1, 66 PC1/NAND_ALE/SPI0_MISO , 67 PC3/NAND_CE1/SPI0_CS , 68 PC2/NAND_CLE/SPI0_CLK 
part C pins: 1 OUT_5V, 22 OUT_5V, 23 GND, 24 GND, 35 GND, 36 GND, 41 OUT_5V, 43 OUT_5V, 44 3,3V, 45 5V_IN_OUT, 46 OUT_3,3V, 47 5V_IN_OUT, 49 GND, 54 GND, 57 GND, 62 OUT_3,3V, 63 GND

## NCP1529ASNT1G
designator DA?
NCP1529ASNT1G, DC-DC преобразователь, Step-down, 1А, 1.7Мгц, Uвых=ADJ [TSOP-5]; Manufacturer: Texas Instruments; Value: NCP1529ASNT1G
footprint SOT-23-5
pins: 1 EN, 2 GND, 3 SW, 4 VIN, 5 FB
text: DC-DC

## SG3524
designator DA?, comment SG3524N
SG3524N, ШИМ-контроллер с управлением по напряжению, 100 мА, 450 кГц; Manufacturer: Texas Instruments
footprint SO-16M
footprint SO-16
footprint DIP-16
pins: 1 IN-, 2 IN+, 3 OSC, 4 CLS+, 5 CLS-, 6 Rt, 7 Ct, 8 GND, 9 COMP, 10 SD, 11 EMIT 1, 12 COL 1, 13 COL 2, 14 EMIT 2, 15 Vcc, 16 Vref
text: PWM

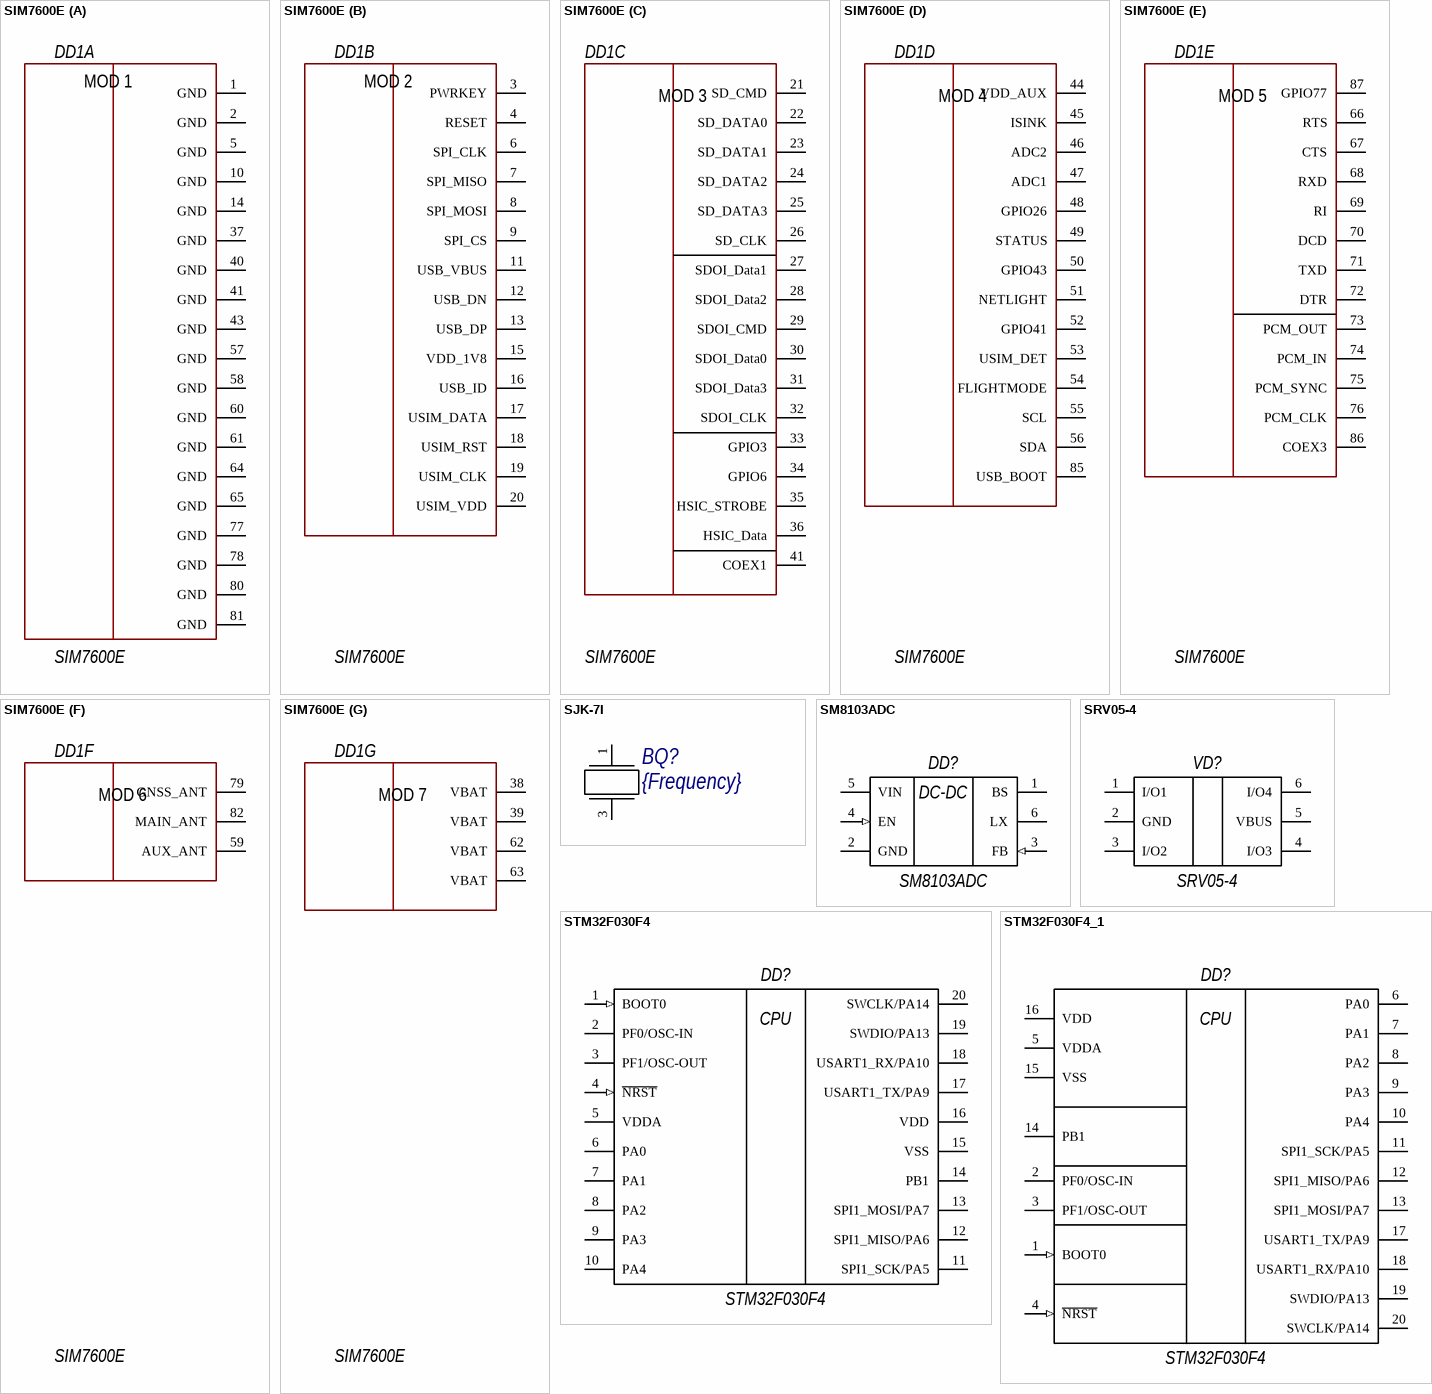
[diagram p5: symbols SIM7600E to STM32F030F4_1]

## SIM7600E
designator DD1
Multi-Band LTE-TDD/LTE-FDD/HSPA+ and GSM/GPRS/EDGE module
footprint SIM7600E
part A pins: 1 GND, 2 GND, 5 GND, 10 GND, 14 GND, 37 GND, 40 GND, 41 GND, 43 GND, 57 GND, 58 GND, 60 GND, 61 GND, 64 GND, 65 GND, 77 GND, 78 GND, 80 GND, 81 GND
part B pins: 3 PWRKEY, 4 RESET, 6 SPI_CLK, 7 SPI_MISO, 8 SPI_MOSI, 9 SPI_CS, 11 USB_VBUS, 12 USB_DN, 13 USB_DP, 15 VDD_1V8, 16 USB_ID, 17 USIM_DATA, 18 USIM_RST, 19 USIM_CLK, 20 USIM_VDD
part C pins: 21 SD_CMD, 22 SD_DATA0, 23 SD_DATA1, 24 SD_DATA2, 25 SD_DATA3, 26 SD_CLK, 27 SDOI_Data1, 28 SDOI_Data2, 29 SDOI_CMD, 30 SDOI_Data0, 31 SDOI_Data3, 32 SDOI_CLK, 33 GPIO3, 34 GPIO6, 35 HSIC_STROBE, 36 HSIC_Data, 41 COEX1
part D pins: 44 VDD_AUX, 45 ISINK, 46 ADC2, 47 ADC1, 48 GPIO26, 49 STATUS, 50 GPIO43, 51 NETLIGHT, 52 GPIO41, 53 USIM_DET, 54 FLIGHTMODE, 55 SCL, 56 SDA, 85 USB_BOOT
part E pins: 66 RTS, 67 CTS, 68 RXD, 69 RI, 70 DCD, 71 TXD, 72 DTR, 73 PCM_OUT, 74 PCM_IN, 75 PCM_SYNC, 76 PCM_CLK, 86 COEX3, 87 GPIO77
part F pins: 59 AUX_ANT, 79 GNSS_ANT, 82 MAIN_ANT
part G pins: 38 VBAT, 39 VBAT, 62 VBAT, 63 VBAT
part A text: MOD 1
part B text: MOD 2
part C text: MOD 3
part D text: MOD 4
part E text: MOD 5
part F text: MOD 6
part G text: MOD 7

## SJK-7I
designator BQ?  Frequency: {Frequency}  (hidden comment: *)
Quartz oscyllator SMT  5,0x3,2x1,0mm; Manufacturer: Geyer; Type: KX-9A
footprint 5032_SMD_crystal
pins: 1, 3 2

## SM8103ADC
designator DD?
SM8103ADC, DC-DC преобразователь, Buck, Uвх=4.2…18В, Uвых=0.8(мин)…18В, 3А, 500кГц
footprint SOT-23-6
pins: 1 BS, 2 GND, 3 FB (in), 4 EN (in), 5 VIN, 6 LX
text: DC-DC

## SRV05-4
designator VD?
footprint SOT-23-6
pins: 1 I/O1, 2 GND, 3 I/O2, 4 I/O3, 5 VBUS, 6 I/O4

## STM32F030F4
designator DD?
STM32F030F4P6TR, Микроконтроллер 32-Бит, Cortex-M0, 48МГц, 16КБ Flash [TSSOP-20.]
footprint TSSOP-20
pins: 1 BOOT0 (in) "Boot memory selection", 2 PF0/OSC-IN, 3 PF1/OSC-OUT, 4 ~{NRST} (in) "Device reset input / internal reset output", 5 VDDA (power) "Analog power supply", 6 PA0, 7 PA1, 8 PA2, 9 PA3, 10 PA4, 11 SPI1_SCK/PA5, 12 SPI1_MISO/PA6, 13 SPI1_MOSI/PA7, 14 PB1, 15 VSS (power) "Ground", 16 VDD (power) "Digital power supply", 17 USART1_TX/PA9, 18 USART1_RX/PA10, 19 SWDIO/PA13, 20 SWCLK/PA14
text: CPU

## STM32F030F4_1
designator DD?, comment STM32F030F4
STM32F030F4P6TR, Микроконтроллер 32-Бит, Cortex-M0, 48МГц, 16КБ Flash [TSSOP-20.]
footprint TSSOP-20
pins: 1 BOOT0 (in) "Boot memory selection", 2 PF0/OSC-IN, 3 PF1/OSC-OUT, 4 ~{NRST} (in) "Device reset input / internal reset output", 5 VDDA (power) "Analog power supply", 6 PA0, 7 PA1, 8 PA2, 9 PA3, 10 PA4, 11 SPI1_SCK/PA5, 12 SPI1_MISO/PA6, 13 SPI1_MOSI/PA7, 14 PB1, 15 VSS (power) "Ground", 16 VDD (power) "Digital power supply", 17 USART1_TX/PA9, 18 USART1_RX/PA10, 19 SWDIO/PA13, 20 SWCLK/PA14
text: CPU

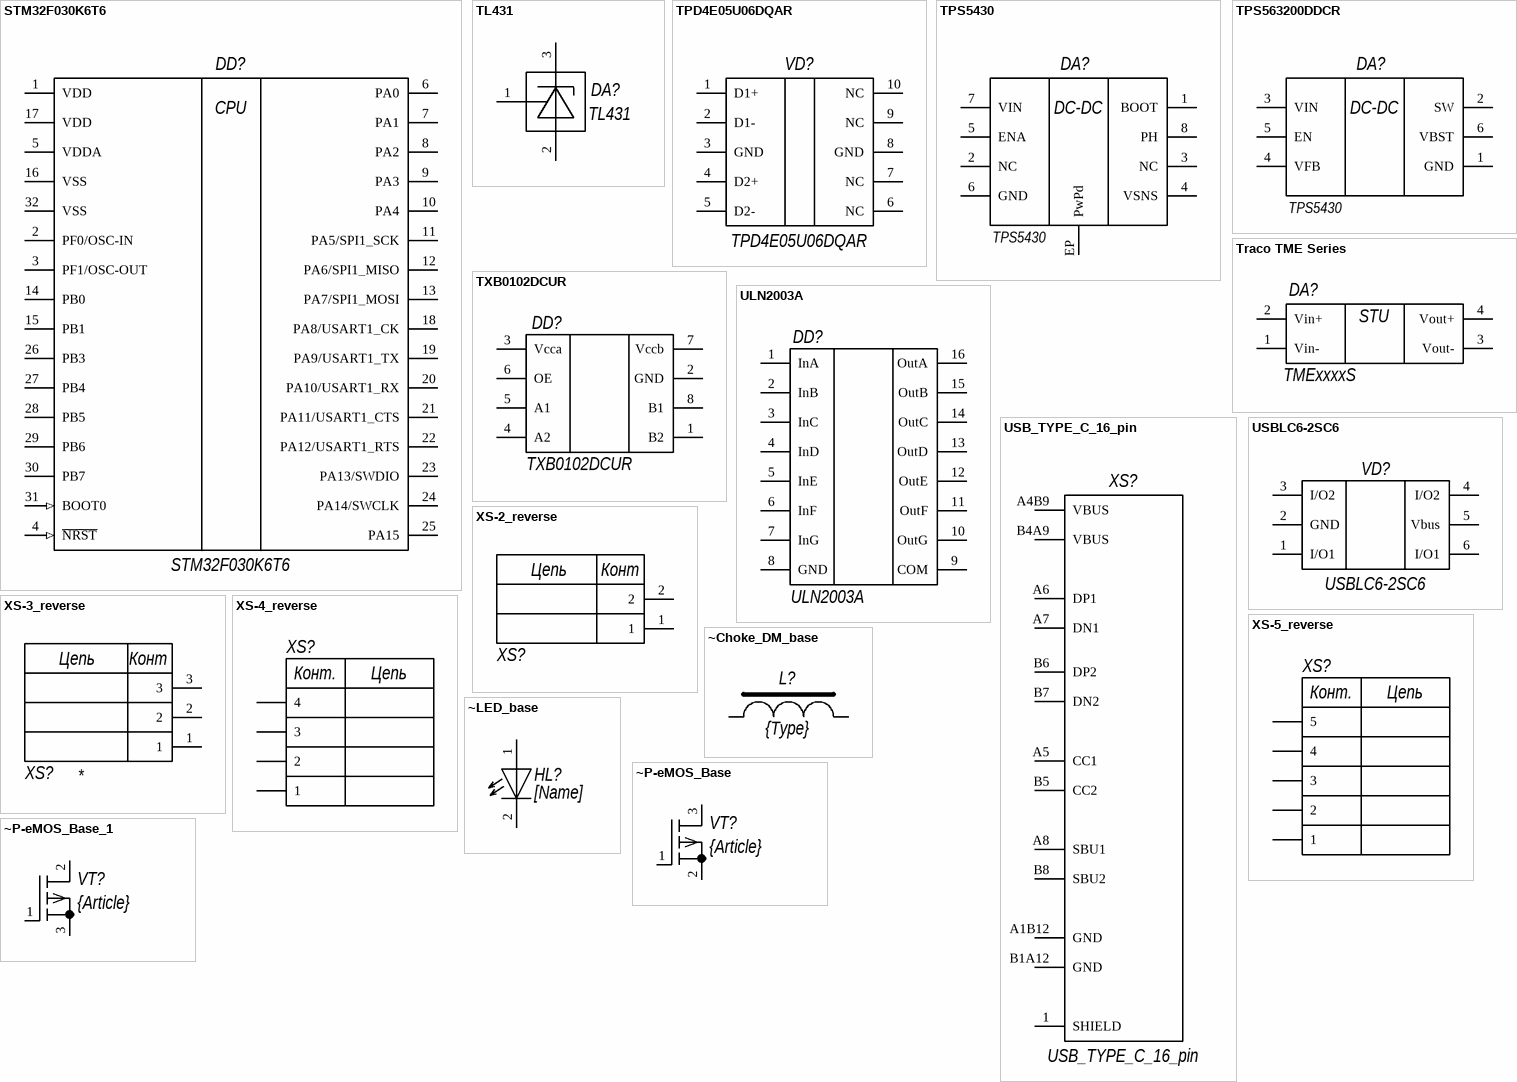
[diagram p6: symbols STM32F030K6T6 to ~P-eMOS_Base_1]

## STM32F030K6T6
designator DD?
STM32F030K6T6, Микроконтроллер 32-bit ARM Cortex M0 RISC 32KB Flash 2.5V/3.3V [LQFP-32]
footprint LQFP-32-7x7-P800
pins: 1 VDD (power) "Digital power supply", 2 PF0/OSC-IN, 3 PF1/OSC-OUT, 4 ~{NRST} (in), 5 VDDA (power) "Analog power supply", 6 PA0, 7 PA1, 8 PA2, 9 PA3, 10 PA4, 11 PA5/SPI1_SCK, 12 PA6/SPI1_MISO, 13 PA7/SPI1_MOSI, 14 PB0, 15 PB1, 16 VSS (power) "Ground", 17 VDD "Digital power supply", 18 PA8/USART1_CK, 19 PA9/USART1_TX, 20 PA10/USART1_RX, 21 PA11/USART1_CTS, 22 PA12/USART1_RTS, 23 PA13/SWDIO, 24 PA14/SWCLK, 25 PA15, 26 PB3, 27 PB4, 28 PB5, 29 PB6, 30 PB7, 31 BOOT0 (in) "Boot memory selection", 32 VSS "Ground"
text: CPU

## TL431
designator DA?
TL431 [TO-92 (KT-26)]
footprint TO-92_Bent
footprint TO-92_2push
footprint TO-226_2pull
footprint SOT-23
footprint SOT-89-3
pins: 1 Vref, 2 Anode, 3 Cathode

## TPD4E05U06DQAR
designator VD?
Сборка защитная TVS-диодов 5.5В_пиковое_ 14В_ограничение 10SON
footprint TPD4E05U06DQAR
pins: 1 D1+, 2 D1-, 3 GND, 4 D2+, 5 D2-, 6 NC, 7 NC, 8 GND, 9 NC, 10 NC

## TPS5430
designator DA?, comment value TPS5430  (hidden comment: TPS5430DDAR)
TPS5430DDAR, DC-DC преобразователь, Step-Down, Uвх=5.5…36В, Uвых=1.221...32.04В, 3А, 500кГц [SOIC-8.]; Manufacturer: Texas Instruments
footprint SO-8EP_3.43x2.79
footprint SO-8EP_3.05x2.29
pins: 1 BOOT, 2 NC, 3 NC, 4 VSNS, 5 ENA, 6 GND, 7 VIN, 8 PH, EP PwPd
text: DC-DC

## TPS563200DDCR
designator DA?  value TPS5430  (hidden comment: TPS563200DDCR)
TPS563200DDCR, DC/DC преобразователь, Buck, ADJ, 3А [TSOT-23-6.]; Manufacturer: Texas Instruments
footprint SOT-23-6
pins: 1 GND, 2 SW, 3 VIN, 4 VFB, 5 EN, 6 VBST
text: DC-DC

## Traco TME Series
designator DA?, comment TMExxxxS
footprint TRACO TME03xx - TME12xx (DC/DC)
pins: 1 Vin-, 2 Vin+, 3 Vout-, 4 Vout+
text: STU

## TXB0102DCUR
designator DD?
Преобразователь уровня напряжения, двунаправленный, 1.2…3.6В - 1.65…5.5В [VSSOP-8.]
footprint VSSOP-8
pins: 1 B2, 2 GND, 3 Vcca, 4 A2, 5 A1, 6 OE, 7 Vccb, 8 B1

## ULN2003A
designator DD?, comment Name: ULN2003A  (hidden comment: Микросхема ULN2003A, 500мА, 50В, DIP-16)
Seven Darlington array, npn, 500мА, 50В
footprint SO-16
pins: 1 InA, 2 InB, 3 InC, 4 InD, 5 InE, 6 InF, 7 InG, 8 GND, 9 COM, 10 OutG, 11 OutF, 12 OutE, 13 OutD, 14 OutC, 15 OutB, 16 OutA

## USB_TYPE_C_16_pin
designator XS?
footprint USB_TYPE_C_16_pin_SMD (USB TYPE-C 16 pin SMD)
footprint USB_TYPE_C_16_pin (USB TYPE-C 16 pin)
pins: 1 SHIELD, A1B12 GND, A4B9 VBUS, A5 CC1, A6 DP1, A7 DN1, A8 SBU1, B1A12 GND, B4A9 VBUS, B5 CC2, B6 DP2, B7 DN2, B8 SBU2

## USBLC6-2SC6
designator VD?
USBLC6-2SC6, Устройство защиты USB от ESD, сборка защитных диодов, 5В [SOT-23-6]
footprint SOT-23-6
pins: 1 I/O1, 2 GND, 3 I/O2, 4 I/O2, 5 Vbus, 6 I/O1

## XS-2_reverse
designator XS?  (value not drawn)
pins: 1, 2
text: Цепь; Конт

## XS-3_reverse
designator XS?
pins: 1, 2, 3
text: Цепь; Конт

## XS-4_reverse
designator XS?  (value not drawn)
pins: 1, 2, 3, 4
text: Конт.; Цепь

## XS-5_reverse
designator XS?  (value not drawn)
pins: 1, 2, 3, 4, 5
text: Конт.; Цепь

## ~Choke_DM_base
designator L?  Type: {Type}  (hidden comment: ~Choke_DM_base)
Standard DIF mode Choke; Manufacturer: {Manufacturer}; Coil former: {Coil former}; Core: {Core}; Bobbin Doc #: {Bobbin Doc #}; Value: {Value}; W1: {Turns}
pins: 1, 2

## ~LED_base
designator HL?, comment [Name]
pins: 1 Anode, 2 Cathode

## ~P-eMOS_Base
designator VT?  Article: {Article}  (hidden comment: *)
Enhanched mode P-MOSFET; Manufacturer: {Manufacturer}; Type/Value: {Type/Value}
pins: 1 G, 2 S, 3 D

## ~P-eMOS_Base_1
designator VT?  Article: {Article}  (hidden comment: *)
Enhanched mode P-MOSFET; Manufacturer: {Manufacturer}; Type/Value: {Type/Value}
pins: 1 G, 2 D, 3 S